# Altium footprint library SWITCHCRAFT_57PC5F.PcbLib: 1 footprints
Each footprint in its own frame and in the unit in brackets; x right, y up, seen from the top. Pads: shape width x height; smd on the part's side, far side on the other; paste and mask are expansions set on the pad; w line width, h text height; cw(c..) or ccw(c..) is an arc to the next point about the centre after c.
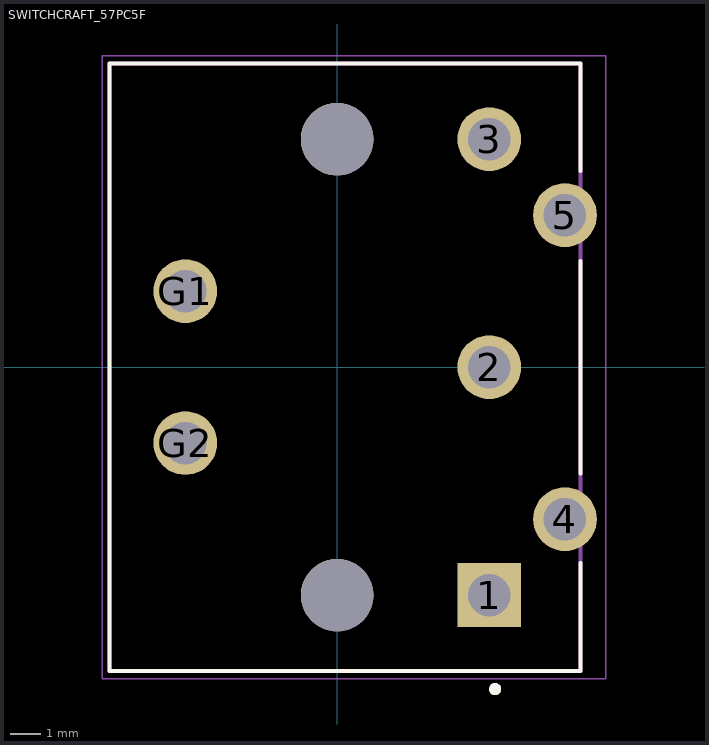
[diagram p0: the footprint, top view; thin cyan lines are the x and y axes]

## SWITCHCRAFT_57PC5F [mm]
height 21
pads (9):
  rect 2.1x2.1 / inner round 2.1 / far side rect 2.1x2.1 hole 1.4: 1(5.01,-7.505)
  round 2.1 hole 1.4: 2(5.01,0) 3(5.01,7.505) 4(7.5,-5.005) 5(7.5,5.005) G1(-5,2.5) G2(-5,-2.5)
  round 2.39 hole 2.39 unplated mask+0.254: ""(0,-7.505) ""(0,7.505)
Top Overlay:
  circle w0.2: c5.2,-10.6 r0.1
  lines w0.127: 8.01,-6.45 8.01,-10 -7.49,-10 -7.49,10 8.01,10 8.01,6.45 ; 8.01,-3.5 8.01,3.5
Assembly Top:
  circle w0.2: c5.2,-10.6 r0.1
  lines w0.127: -7.49,-10 -7.49,10 8.01,10 8.01,-10 -7.49,-10
Courtyard Top:
  lines w0.05: -7.74,-10.25 -7.74,10.25 8.85,10.25 8.85,-10.25 -7.74,-10.25
3D body "step_temp.STEP": height 23.7, standoff -0.85, extent -7.493,-10.033 8.001,9.931